# Altium footprint library chipfc_libs.PCBLIB: 315 footprints (part 10 of 20)
Each footprint in its own frame and in the unit in brackets; x right, y up, seen from the top. Pads: shape width x height; smd on the part's side, far side on the other; paste and mask are expansions set on the pad; w line width, h text height; cw(c..) or ccw(c..) is an arc to the next point about the centre after c.
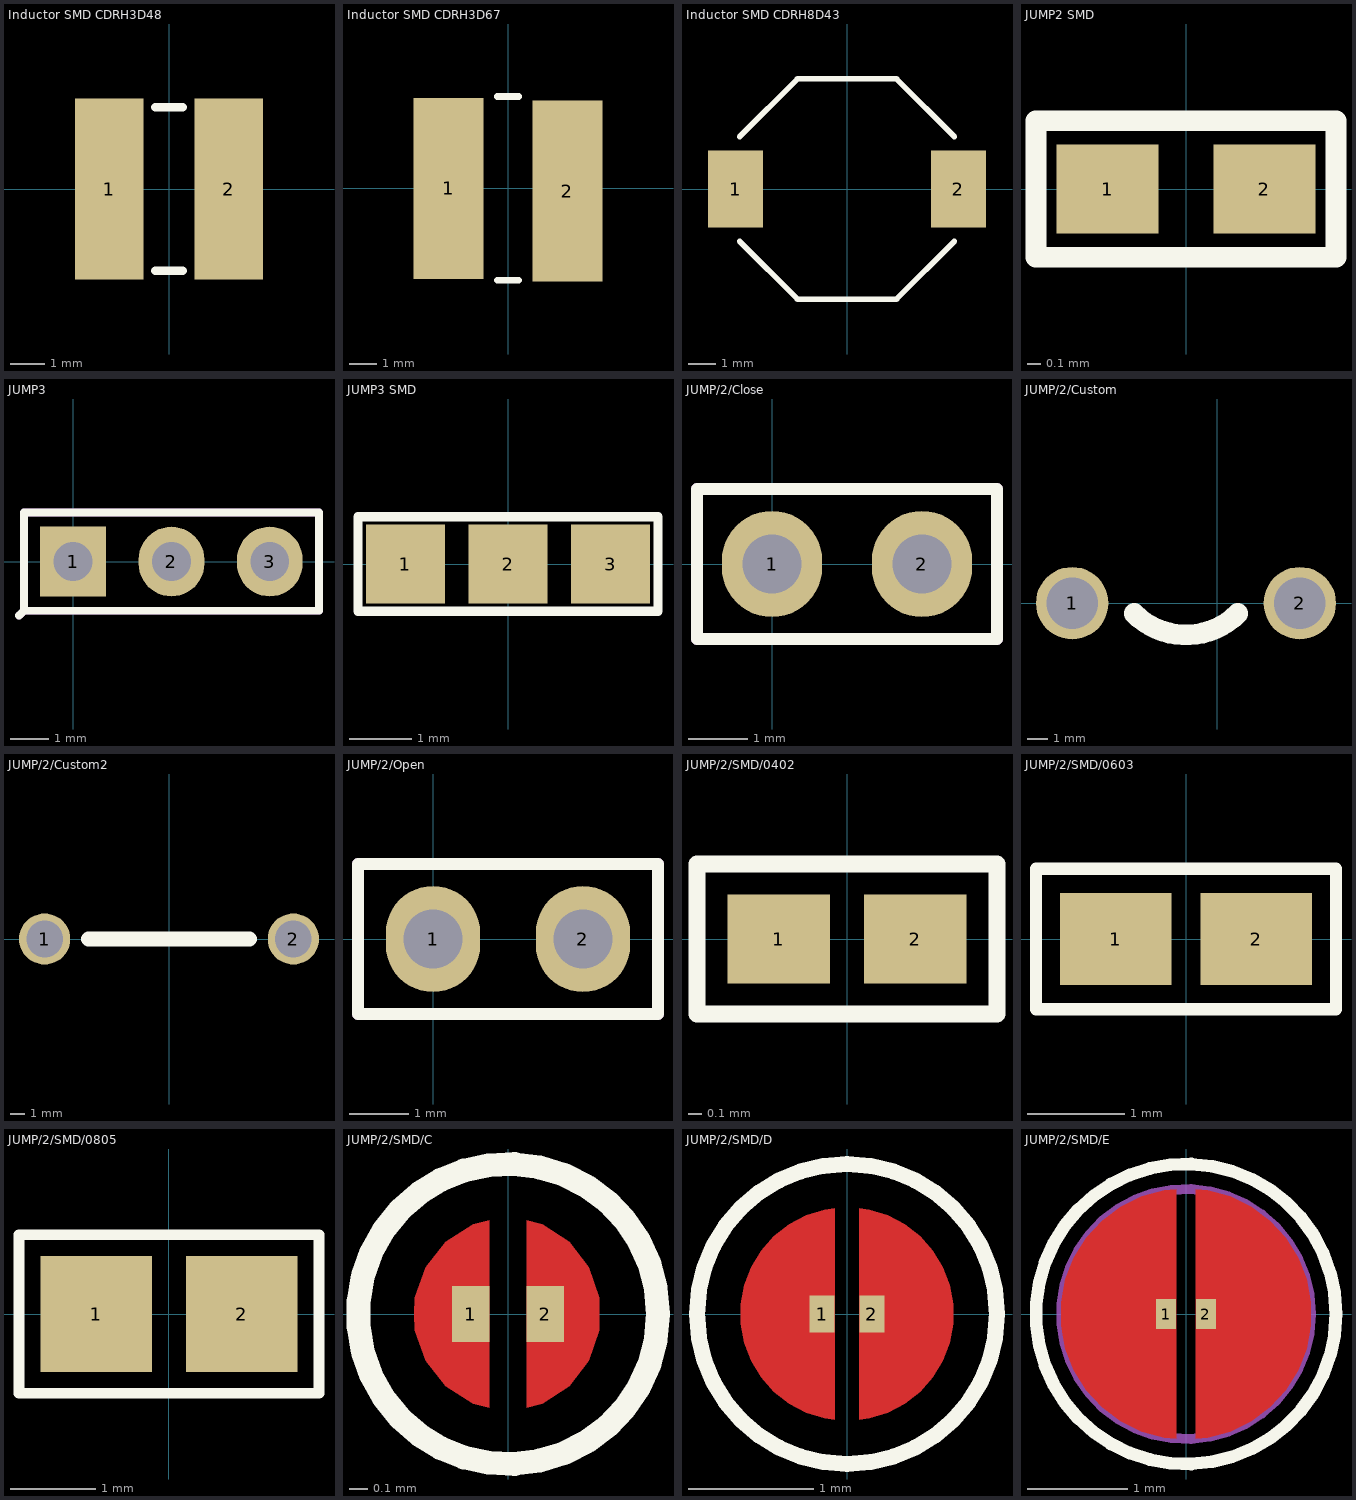
[diagram p9: the footprints below, top view; thin cyan lines are the x and y axes]

## Inductor SMD CDRH3D48 [mm] "Precision Wire Wound Inductor, 2-Leads, Body 10.0x8.0mm, IPC Low Density"
height 4.5
pads (2):
  rect 2x5.3 smd: 1(-1.75,0) 2(1.75,0)
Top Overlay:
  lines w0.254: -0.4,-2.4 0.4,-2.4 ; -0.4,2.4 0.4,2.4
3D body "User Library-SDR0403.STEP": height 3.5, standoff 0, extent -2.25,-2.241 2.25,2.25

## Inductor SMD CDRH3D67 [mm] "Precision Wire Wound Inductor, 2-Leads, Body 10.0x8.0mm, IPC Low Density"
height 4.5
pads (2):
  rect 2.6x6.7 smd: 1(-2.2,0) 2(2.2,-0.1)
Top Overlay:
  lines w0.254: -0.4,-3.4 0.4,-3.4 ; -0.4,3.4 0.4,3.4
3D body "SUMIDA-CDRH6D28.step": height 2.9, standoff 0, extent -3.35,-3.35 3.35,3.35

## Inductor SMD CDRH8D43 [mm] "Precision Wire Wound Inductor, 2-Leads, Body 10.0x8.0mm, IPC Low Density"
height 4.5
pads (2):
  rect 2x2.8 smd: 1(-4.05,0) 2(4.05,0)
Top Overlay:
  lines w0.203: -3.9,-1.9 -1.8,-4 1.8,-4 3.9,-1.9 ; -3.9,1.9 -1.8,4 1.8,4 3.9,1.9
3D body "User Library-6mm radial ceramic disc capacitor.step": height 4.35, standoff 0, extent -5.657,-5.657 5.657,5.657

## JUMP2 SMD [mm]
pads (2):
  rect 0.75x0.65 smd: 1(-0.575,0) 2(0.575,0)
Top Overlay:
  lines w0.152: -1.1,-0.5 1.1,-0.5 1.1,0.5 -1.1,0.5 -1.1,-0.5

## JUMP3 [mm]
pads (3):
  rect 1.7x1.8 hole 1: 1(0,0)
  oval 1.7x1.8 hole 1: 2(2.54,0) 3(5.08,0)
Top Overlay:
  lines w0.203: -1.397,-1.397 -1.27,-1.27 ; -1.27,-1.27 -1.27,1.27 6.35,1.27 6.35,-1.27 -1.27,-1.27
Mechanical 1:
  lines w0.203: -1.397,-1.397 -1.27,-1.27 ; -1.27,-1.27 -1.27,1.27 6.35,1.27 6.35,-1.27 -1.27,-1.27
3D body "Samtec Header 3pin 2.54mm.STEP": height 8.89, standoff -2.03, extent -1.27,-1.27 6.35,1.27
3D body "User Library-SHORTING JUMPER.step": height 8.54, standoff 2.64, extent -1.27,-1.27 3.81,1.27

## JUMP3 SMD [mil]
pads (3):
  rect 50x50 smd: 1(-65,0) 2(0,0) 3(65,0)
Top Overlay:
  lines w6: -95,-30 -95,30 95,30 95,-30 -95,-30

## JUMP/2/Close [mm]
pads (2):
  oval 1.7x1.8 hole 1: 1(0,0) 2(2.54,0)
Top Overlay:
  lines w0.203: -1.27,-1.27 -1.27,1.27 3.81,1.27 3.81,-1.27 -1.27,-1.27
Mechanical 1:
  lines w0.203: -1.27,-1.27 -1.27,1.27 3.81,1.27 3.81,-1.27 -1.27,-1.27
3D body "Samtec Header 2pin 2.54mm.STEP": height 8.89, standoff -2.03, extent -1.27,-1.27 3.81,1.27
3D body "User Library-SHORTING JUMPER.step": height 8.54, standoff 2.64, extent -1.27,-1.27 3.81,1.27

## JUMP/2/Custom [mm]
pads (2):
  round 3.5 hole 2.5: 1(-7,0) 2(4,0)
Top Overlay:
  lines w1: -4,-0.5 ccw(c-1.5,2) 1,-0.5

## JUMP/2/Custom2 [mm]
pads (2):
  round 3.5 hole 2.5: 1(-8.5,0) 2(8.5,0)
Top Overlay:
  lines w1: -5.5,0 5.5,0

## JUMP/2/Open [mm]
pads (2):
  oval 1.6x1.8 hole 1: 1(0,0) 2(2.54,0)
Top Overlay:
  lines w0.203: -1.27,-1.27 -1.27,1.27 3.81,1.27 3.81,-1.27 -1.27,-1.27
Mechanical 1:
  lines w0.203: -1.27,-1.27 -1.27,1.27 3.81,1.27 3.81,-1.27 -1.27,-1.27
3D body "Samtec Header 2pin 2.54mm.STEP": height 8.89, standoff -2.03, extent -1.27,-1.27 3.81,1.27

## JUMP/2/SMD/0402 [mm]
pads (2):
  rect 0.75x0.65 smd: 1(-0.5,0) 2(0.5,0)
Top Overlay:
  lines w0.127: -1.1,-0.55 -1.1,0.55 1.1,0.55 1.1,-0.55 -1.1,-0.55

## JUMP/2/SMD/0603 [mm] "Chip Resistor, 2-Leads, Body 1.6x0.8mm, IPC Medium Density"
height 0.55
pads (2):
  rect 1.15x0.95 smd: 1(-0.725,0) 2(0.725,0)
Top Overlay:
  lines w0.127: -1.55,-0.725 1.55,-0.725 1.55,0.725 -1.55,0.725 -1.55,-0.725

## JUMP/2/SMD/0805 [mm] "Chip Resistor, 2-Leads, Body 2.0x1.3mm, IPC Medium Density"
height 0.5
pads (2):
  rect 1.3x1.35 smd: 1(-0.85,0) 2(0.85,0)
Top Overlay:
  lines w0.127: -1.75,-0.925 -1.75,0.925 1.75,0.925 1.75,-0.925 -1.75,-0.925

## JUMP/2/SMD/C [mm] "Chip Resistor, 2-Leads, Body 1.6x0.8mm, IPC Medium Density"
height 0.55
pads (2):
  rect 0.2x0.3 smd: 1(-0.2,0) 2(0.2,0)
Top Layer:
  region: 0.1,-0.5 0.1,0.5 0.183,0.478 0.327,0.384 0.432,0.248 0.487,0.086 0.487,0 0.487,-0.086 0.432,-0.248 0.327,-0.384 0.183,-0.478
  region: -0.1,0.5 -0.1,-0.5 -0.185,-0.48 -0.331,-0.386 -0.44,-0.251 -0.499,-0.087 -0.5,0 -0.499,0.087 -0.44,0.251 -0.331,0.386 -0.185,0.48
Top Overlay:
  circle w0.127: c0,0 r0.8
Top Solder:
  region: 0,0.6 0.119,0.6 0.34,0.509 0.509,0.34 0.6,0.119 0.6,0 0.6,-0.119 0.509,-0.34 0.34,-0.509 0.119,-0.6 0,-0.6
  region: 0,-0.6 -0.119,-0.6 -0.34,-0.509 -0.509,-0.34 -0.6,-0.119 -0.6,0 -0.6,0.119 -0.509,0.34 -0.34,0.509 -0.119,0.6 0,0.6

## JUMP/2/SMD/D [mm] "Chip Resistor, 2-Leads, Body 1.6x0.8mm, IPC Medium Density"
height 0.55
pads (2):
  rect 0.2x0.3 smd: 1(-0.2,0) 2(0.2,0)
Top Layer:
  region: 0.1,0.844 0.177,0.835 0.325,0.789 0.462,0.718 0.584,0.622 0.687,0.507 0.767,0.374 0.822,0.23 0.85,0.077 0.85,0 0.85,-0.077 0.822,-0.23 0.767,-0.374 0.687,-0.507 0.584,-0.622 0.462,-0.718 0.325,-0.789 0.177,-0.835 0.1,-0.844
  region: -0.1,-0.844 -0.177,-0.835 -0.325,-0.789 -0.462,-0.718 -0.584,-0.622 -0.687,-0.507 -0.767,-0.374 -0.822,-0.23 -0.85,-0.077 -0.85,0 -0.85,0.077 -0.822,0.23 -0.767,0.374 -0.687,0.507 -0.584,0.622 -0.462,0.718 -0.325,0.789 -0.177,0.835 -0.1,0.844
Top Overlay:
  circle w0.127: c0,0 r1.2
Top Solder:
  region: 0,-0.6 -0.119,-0.6 -0.34,-0.509 -0.509,-0.34 -0.6,-0.119 -0.6,0 -0.6,0.119 -0.509,0.34 -0.34,0.509 -0.119,0.6 0,0.6
  region: 0,0.6 0.119,0.6 0.34,0.509 0.509,0.34 0.6,0.119 0.6,0 0.6,-0.119 0.509,-0.34 0.34,-0.509 0.119,-0.6 0,-0.6
  region: 0,1 0.098,1 0.292,0.962 0.474,0.886 0.637,0.777 0.777,0.637 0.886,0.474 0.962,0.292 1,0.098 1,0 1,-0.098 0.962,-0.292 0.886,-0.474 0.777,-0.637 0.637,-0.777 0.474,-0.886 0.292,-0.962 0.098,-1 0,-1 -0.098,-1 -0.292,-0.962 -0.474,-0.886 -0.637,-0.777 -0.777,-0.637 -0.886,-0.474 -0.962,-0.292 -1,-0.098 -1,0 -1,0.098 -0.962,0.292 -0.886,0.474 -0.777,0.637 -0.637,0.777 -0.474,0.886 -0.292,0.962 -0.098,1

## JUMP/2/SMD/E [mm] "Chip Resistor, 2-Leads, Body 1.6x0.8mm, IPC Medium Density"
height 0.55
pads (2):
  rect 0.2x0.3 smd: 1(-0.2,0) 2(0.2,0)
Top Layer:
  region: -0.1,1.246 -0.216,1.237 -0.442,1.175 -0.652,1.073 -0.839,0.934 -0.998,0.762 -1.122,0.564 -1.207,0.346 -1.25,0.117 -1.25,0 -1.25,-0.117 -1.207,-0.346 -1.122,-0.564 -0.998,-0.762 -0.839,-0.934 -0.652,-1.073 -0.442,-1.175 -0.216,-1.237 -0.1,-1.246
  region: 0.1,1.246 0.216,1.237 0.442,1.175 0.652,1.073 0.839,0.934 0.998,0.762 1.122,0.564 1.207,0.346 1.25,0.117 1.25,0 1.25,-0.117 1.207,-0.346 1.122,-0.564 0.998,-0.762 0.839,-0.934 0.652,-1.073 0.442,-1.175 0.216,-1.237 0.1,-1.246
  region: 0.1,0.887 0.177,0.878 0.324,0.833 0.461,0.761 0.583,0.666 0.686,0.551 0.766,0.418 0.821,0.274 0.849,0.122 0.849,0.045 0.853,-0.035 0.831,-0.194 0.78,-0.346 0.702,-0.486 0.598,-0.609 0.474,-0.71 0.333,-0.786 0.18,-0.835 0.1,-0.844
Top Overlay:
  circle w0.127: c0,0 r1.5
Top Solder:
  region: 0,1.35 0.133,1.35 0.394,1.298 0.639,1.196 0.861,1.049 1.049,0.861 1.196,0.639 1.298,0.394 1.35,0.133 1.35,0 1.35,-0.133 1.298,-0.394 1.196,-0.639 1.049,-0.861 0.861,-1.049 0.639,-1.196 0.394,-1.298 0.133,-1.35 0,-1.35 -0.133,-1.35 -0.394,-1.298 -0.639,-1.196 -0.861,-1.049 -1.049,-0.861 -1.196,-0.639 -1.298,-0.394 -1.35,-0.133 -1.35,0 -1.35,0.133 -1.298,0.394 -1.196,0.639 -1.049,0.861 -0.861,1.049 -0.639,1.196 -0.394,1.298 -0.133,1.35
Mechanical 1:
  circle w0.1: c0,0 r1.25